# Altium footprint library ELO301_G1.PcbLib: 17 footprints (part 2 of 2)
Each footprint in its own frame and in the unit in brackets; x right, y up, seen from the top. Pads: shape width x height; smd on the part's side, far side on the other; paste and mask are expansions set on the pad; w line width, h text height; cw(c..) or ccw(c..) is an arc to the next point about the centre after c.
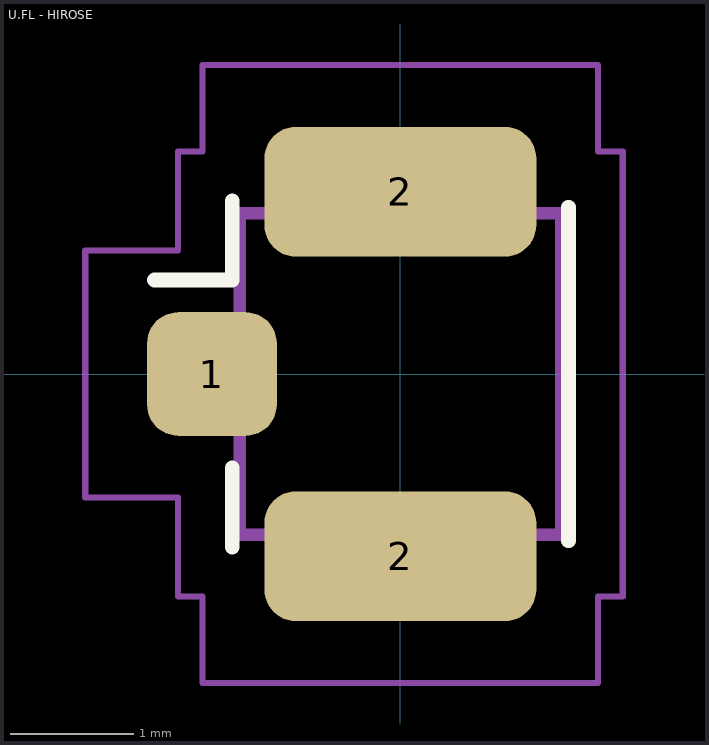
[diagram p1: the footprint, top view; thin cyan lines are the x and y axes]

## U.FL - HIROSE [mm] "Hirose U.FL Coaxial (https://www.hirose.com/en/product/document?clcode=CL0331-0472-2-01&productname=U.FL-R-SMT-1(01)&series=U.FL&documenttype=2DDrawing&lang=en&documentid=0000940668)"
pads (3):
  rrect50% 1.05x1 smd: 1(-1.525,0)
  rrect48% 2.2x1.05 smd: 2(0,-1.475) 2(0,1.475)
Top Overlay:
  lines w0.12: -1.99,0.76 -1.36,0.76 -1.36,1.4 ; -1.36,-1.4 -1.36,-0.76 ; 1.36,-1.35 1.36,1.35
Mechanical 13:
  lines w0.1: -1.55,-0.3 -1.55,0.15 -1.4,0.3 -1.3,0.3 -1.3,1.3 -0.9,1.3 -0.9,1.5 0.9,1.5 0.9,1.3 1.3,1.3 1.3,-1.3 0.9,-1.3 0.9,-1.5 -0.9,-1.5 -0.9,-1.3 -1.3,-1.3 -1.3,-0.3 -1.55,-0.3
Mechanical 15:
  lines w0.05: -2.55,-1 -1.8,-1 -1.8,-1.8 -1.6,-1.8 -1.6,-2.5 1.6,-2.5 1.6,-1.8 1.8,-1.8 1.8,1.8 1.6,1.8 1.6,2.5 -1.6,2.5 -1.6,1.8 -1.8,1.8 -1.8,1 -2.55,1 -2.55,-1
Mechanical 29:
  text ".Designator" at -0.508,-0.102 h0.25